# EAGLE library part HDR-1X08 (library connectors)
Pin header 1 x 8
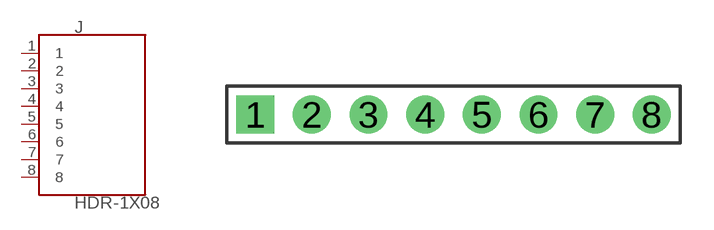
[diagram p1: symbol with the pads of HDR-1X08; footprint HDR-1X08]

Designator prefix J

## HDR-1X08  [HDR-1X08]
1  1  pas
2  2  pas
3  3  pas
4  4  pas
5  5  pas
6  6  pas
7  7  pas
8  8  pas

## Footprint HDR-1X08 (pad centres in mm)
Pin header, 1 row of 8, pitch 2.54 mm. Sizes: 0.1 inch (2.54 mm) pin strip grid; pads worked out for this kit. Not verified against a datasheet.
drill 1 pad 1.7 square: 1 -8.89,0
drill 1 pad 1.7: 2 -6.35,0; 3 -3.81,0; 4 -1.27,0; 5 1.27,0; 6 3.81,0; 7 6.35,0; 8 8.89,0